# Altium schematic symbol library 0603CS-18NXJRW.SchLib: 1 symbol
Pins are listed as number, name and electrical type; pins without a type are passive.

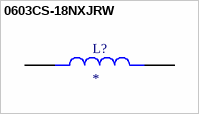
[diagram p0: symbol 0603CS-18NXJRW]

## 0603CS-18NXJRW
designator L?
MP: 0603CS-18NXJRW; Package: None; Price: None; Value: *; Availability: Unavailable
footprint IND_0603CS-18NXJRW
pins: 1, 2